# Altium footprint library TMDE_REV1.0.PcbLib: 94 footprints (part 4 of 6)
Each footprint in its own frame and in the unit in brackets; x right, y up, seen from the top. Pads: shape width x height; smd on the part's side, far side on the other; paste and mask are expansions set on the pad; w line width, h text height; cw(c..) or ccw(c..) is an arc to the next point about the centre after c.
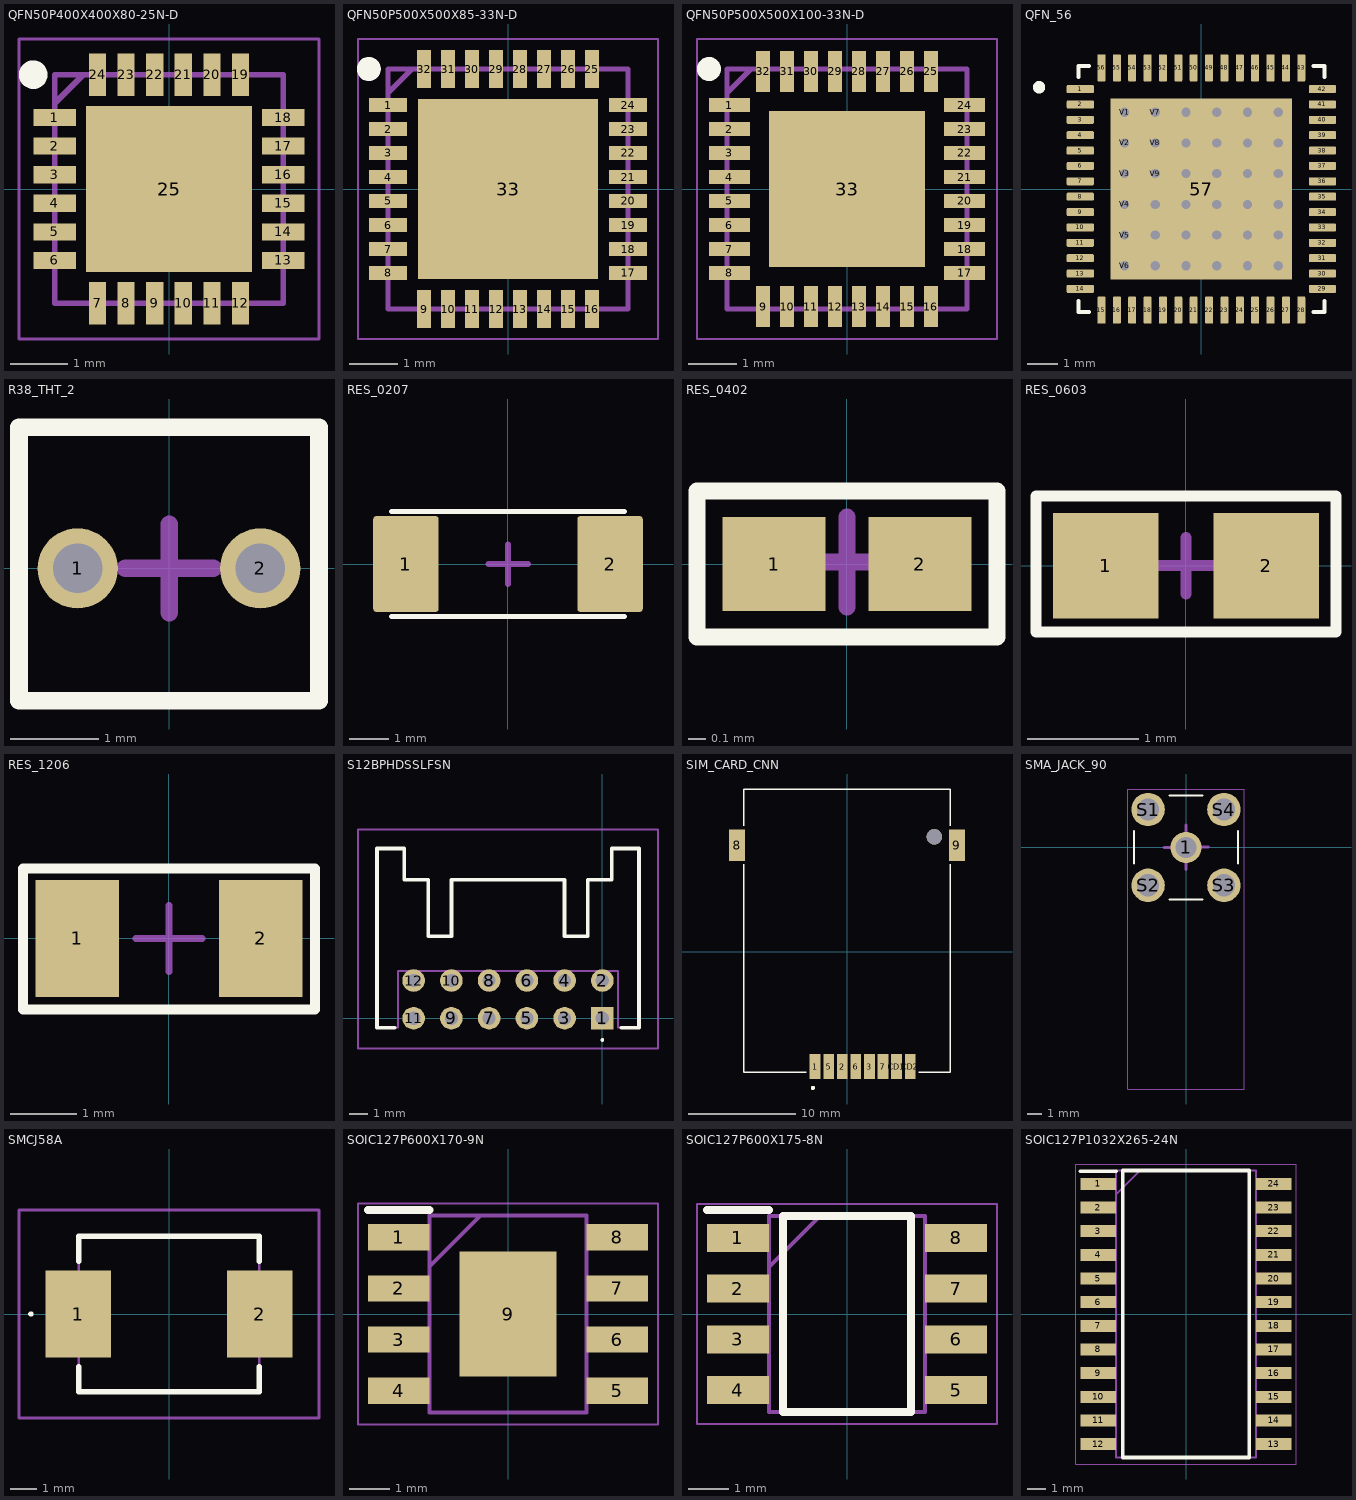
[diagram p3: the footprints below, top view; thin cyan lines are the x and y axes]

## QFN50P400X400X80-25N-D [mm]
pads (25):
  rect 0.75x0.3 smd: 1(-2,1.25) 2(-2,0.75) 3(-2,0.25) 4(-2,-0.25) 5(-2,-0.75) 6(-2,-1.25) 13(2,-1.25) 14(2,-0.75) 15(2,-0.25) 16(2,0.25) 17(2,0.75) 18(2,1.25)
  rect 0.3x0.75 smd: 7(-1.25,-2) 8(-0.75,-2) 9(-0.25,-2) 10(0.25,-2) 11(0.75,-2) 12(1.25,-2) 19(1.25,2) 20(0.75,2) 21(0.25,2) 22(-0.25,2) 23(-0.75,2) 24(-1.25,2)
  rect 2.9x2.9 smd: 25(0,0)
Top Overlay:
  circle w0.25: c-2.375,2 r0.125
Mechanical 13:
  lines w0.1: -2,1.5 -1.5,2 ; -2,-2 -2,2 2,2 2,-2 -2,-2
Mechanical 15:
  lines w0.05: -2.625,-2.625 -2.625,2.625 2.625,2.625 2.625,-2.625 -2.625,-2.625
3D body "CAT4016HV6-GT2.stp": height 0.8, standoff 0, extent -2.05,-2.05 2.05,2.05

## QFN50P500X500X85-33N-D [mm]
pads (33):
  rect 0.8x0.3 smd: 1(-2.5,1.75) 2(-2.5,1.25) 3(-2.5,0.75) 4(-2.5,0.25) 5(-2.5,-0.25) 6(-2.5,-0.75) 7(-2.5,-1.25) 8(-2.5,-1.75) 17(2.5,-1.75) 18(2.5,-1.25) 19(2.5,-0.75) 20(2.5,-0.25) 21(2.5,0.25) 22(2.5,0.75) 23(2.5,1.25) 24(2.5,1.75)
  rect 0.3x0.8 smd: 9(-1.75,-2.5) 10(-1.25,-2.5) 11(-0.75,-2.5) 12(-0.25,-2.5) 13(0.25,-2.5) 14(0.75,-2.5) 15(1.25,-2.5) 16(1.75,-2.5) 25(1.75,2.5) 26(1.25,2.5) 27(0.75,2.5) 28(0.25,2.5) 29(-0.25,2.5) 30(-0.75,2.5) 31(-1.25,2.5) 32(-1.75,2.5)
  rect 3.75x3.75 smd: 33(0,0)
Top Overlay:
  circle w0.25: c-2.9,2.5 r0.125
Mechanical 13:
  lines w0.1: -2.5,2 -2,2.5 ; -2.5,-2.5 -2.5,2.5 2.5,2.5 2.5,-2.5 -2.5,-2.5
Mechanical 15:
  lines w0.05: -3.125,-3.125 -3.125,3.125 3.125,3.125 3.125,-3.125 -3.125,-3.125
3D body "PCA8561AHN_AY.stp": height 0.86, standoff 0.01, extent -2.56,-2.56 2.56,2.56

## QFN50P500X500X100-33N-D [mm]
pads (33):
  rect 0.85x0.3 smd: 1(-2.45,1.75) 2(-2.45,1.25) 3(-2.45,0.75) 4(-2.45,0.25) 5(-2.45,-0.25) 6(-2.45,-0.75) 7(-2.45,-1.25) 8(-2.45,-1.75) 17(2.45,-1.75) 18(2.45,-1.25) 19(2.45,-0.75) 20(2.45,-0.25) 21(2.45,0.25) 22(2.45,0.75) 23(2.45,1.25) 24(2.45,1.75)
  rect 0.3x0.85 smd: 9(-1.75,-2.45) 10(-1.25,-2.45) 11(-0.75,-2.45) 12(-0.25,-2.45) 13(0.25,-2.45) 14(0.75,-2.45) 15(1.25,-2.45) 16(1.75,-2.45) 25(1.75,2.45) 26(1.25,2.45) 27(0.75,2.45) 28(0.25,2.45) 29(-0.25,2.45) 30(-0.75,2.45) 31(-1.25,2.45) 32(-1.75,2.45)
  rect 3.25x3.25 smd: 33(0,0)
Top Overlay:
  circle w0.25: c-2.875,2.5 r0.125
Mechanical 13:
  lines w0.1: -2.5,2 -2,2.5 ; -2.5,-2.5 2.5,-2.5 2.5,2.5 -2.5,2.5 -2.5,-2.5
Mechanical 15:
  lines w0.05: -3.125,-3.125 3.125,-3.125 3.125,3.125 -3.125,3.125 -3.125,-3.125
3D body "MFRC52201HN1,115.stp": height 1, standoff 0, extent -2.55,-2.55 2.55,2.55

## QFN_56 [mm]
pads (93):
  rrect25% 0.88x0.26 smd: 1(-3.94,3.25) 2(-3.94,2.75) 3(-3.94,2.25) 4(-3.94,1.75) 5(-3.94,1.25) 6(-3.94,0.75) 7(-3.94,0.25) 8(-3.94,-0.25) 9(-3.94,-0.75) 10(-3.94,-1.25) 11(-3.94,-1.75) 12(-3.94,-2.25) 13(-3.94,-2.75) 14(-3.94,-3.25) 29(3.94,-3.25) 30(3.94,-2.75) 31(3.94,-2.25) 32(3.94,-1.75) 33(3.94,-1.25) 34(3.94,-0.75) 35(3.94,-0.25) 36(3.94,0.25) 37(3.94,0.75) 38(3.94,1.25) 39(3.94,1.75) 40(3.94,2.25) 41(3.94,2.75) 42(3.94,3.25)
  rrect25% 0.26x0.88 smd: 15(-3.25,-3.94) 16(-2.75,-3.94) 17(-2.25,-3.94) 18(-1.75,-3.94) 19(-1.25,-3.94) 20(-0.75,-3.94) 21(-0.25,-3.94) 22(0.25,-3.94) 23(0.75,-3.94) 24(1.25,-3.94) 25(1.75,-3.94) 26(2.25,-3.94) 27(2.75,-3.94) 28(3.25,-3.94) 43(3.25,3.94) 44(2.75,3.94) 45(2.25,3.94) 46(1.75,3.94) 47(1.25,3.94) 48(0.75,3.94) 49(0.25,3.94) 50(-0.25,3.94) 51(-0.75,3.94) 52(-1.25,3.94) 53(-1.75,3.94) 54(-2.25,3.94) 55(-2.75,3.94) 56(-3.25,3.94)
  rect 5.9x5.9 smd paste-4: 57(0,0)
  round 0.4 hole 0.3: V1(-2.5,2.5) V2(-2.5,1.5) V3(-2.5,0.5) V4(-2.5,-0.5) V5(-2.5,-1.5) V6(-2.5,-2.5) V7(-1.5,2.5) V8(-1.5,1.5) V9(-1.5,0.5) V10(-1.5,-0.5) V11(-1.5,-1.5) V12(-1.5,-2.5) V13(-0.5,2.5) V14(-0.5,1.5) V15(-0.5,0.5) V16(-0.5,-0.5) V17(-0.5,-1.5) V18(-0.5,-2.5) V19(0.5,2.5) V20(0.5,1.5) V21(0.5,0.5) V22(0.5,-0.5) V23(0.5,-1.5) V24(0.5,-2.5) V25(1.5,2.5) V26(1.5,1.5) V27(1.5,0.5) V28(1.5,-0.5) V29(1.5,-1.5) V30(1.5,-2.5) V31(2.5,2.5) V32(2.5,1.5) V33(2.5,0.5) V34(2.5,-0.5) V35(2.5,-1.5) V36(2.5,-2.5)
Top Overlay:
  circle w0.2: c-5.28,3.31 r0.1
  lines w0.127: -4,-3.65 -4,-4 -3.65,-4 ; -4,3.65 -4,4 -3.65,4 ; 3.65,-4 4,-4 4,-3.65 ; 3.65,4 4,4 4,3.65
Top Paste:
  region: 2.7,1.5 1.5,1.5 1.5,2.7 2.7,2.7
  region: 2.7,0.1 1.5,0.1 1.5,1.3 2.7,1.3
  region: 2.7,-1.3 1.5,-1.3 1.5,-0.1 2.7,-0.1
  region: 2.7,-2.7 1.5,-2.7 1.5,-1.5 2.7,-1.5
  region: -1.5,-2.7 -2.7,-2.7 -2.7,-1.5 -1.5,-1.5
  region: 1.3,-2.7 0.1,-2.7 0.1,-1.5 1.3,-1.5
  region: -0.1,-2.7 -1.3,-2.7 -1.3,-1.5 -0.1,-1.5
  region: 1.3,1.5 0.1,1.5 0.1,2.7 1.3,2.7
  region: -0.1,1.5 -1.3,1.5 -1.3,2.7 -0.1,2.7
  region: -1.5,1.5 -2.7,1.5 -2.7,2.7 -1.5,2.7
  region: -1.5,0.1 -2.7,0.1 -2.7,1.3 -1.5,1.3
  region: -1.5,-1.3 -2.7,-1.3 -2.7,-0.1 -1.5,-0.1
  region: 1.3,-1.3 0.1,-1.3 0.1,-0.1 1.3,-0.1
  region: -0.1,-1.3 -1.3,-1.3 -1.3,-0.1 -0.1,-0.1
  region: 1.3,0.1 0.1,0.1 0.1,1.3 1.3,1.3
  region: -0.1,0.1 -1.3,0.1 -1.3,1.3 -0.1,1.3
3D body "LAN9303I-ABZJ-TR.STEP": height 1, standoff 0, extent -4,-4 4,4

## R38_THT_2 [mm]
pads (2):
  round 0.91 hole 0.56: 1(-1.039,-0.002) 2(1.031,-0.002)
Top Overlay:
  lines w0.2: -1.704,-1.502 -1.704,1.598 1.696,1.598 1.696,-1.502 -1.704,-1.502
Mechanical 16:
  lines w0.2: -0.497,-0.002 0.003,-0.002 ; -0.004,-0.002 0.496,-0.002 ; -0.001,-0.502 -0.001,-0.002 ; 0,0 0,0.5
3D body "AB38T-32.768KHZ--3DModel-STEP-400430.STEP": height 9.3, standoff -8, extent -1.628,-1.602 1.549,1.598

## RES_0207 [mm]
pads (2):
  rrect10% 1.66x2.43 smd: 1(-2.585,0) 2(2.585,0)
Top Overlay:
  lines w0.127: -2.95,-1.33 2.95,-1.33 ; -2.95,1.33 2.95,1.33
Mechanical 16:
  lines w0.152: -0.496,-0.001 0.004,-0.001 ; 0,0 0,0.5 ; 0.004,-0.501 0.004,-0.001 ; 0.504,-0.001 0.004,-0.001
3D body "2-1879283-8.stp": height 2.3, standoff 0.1, extent -2.95,-1.11 2.95,1.11

## RES_0402 [mm]
pads (2):
  rect 0.6x0.55 smd mask+0.102: 1(-0.425,0) 2(0.425,0)
Top Overlay:
  lines w0.1: -0.875,-0.425 0.875,-0.425 0.875,0.425 -0.875,0.425 -0.875,-0.425
Mechanical 16:
  lines w0.1: -0.262,0.013 0.263,0.013 ; 0,-0.25 0,0.275
3D body "SW3dPS-d0402h025.STEP": height 0.25, standoff 0, extent -0.5,-0.25 0.5,0.25

## RES_0603 [mm]
pads (2):
  rect 0.95x0.95 smd mask+0.102: 1(-0.725,0) 2(0.725,0)
Top Overlay:
  lines w0.1: -1.355,-0.601 -1.355,0.631 1.355,0.631 1.355,-0.601 -1.355,-0.601
Mechanical 16:
  lines w0.1: -0.254,0 0.254,0 ; 0,-0.254 0,0.254
3D body "User Library-V0603HD.STEP": height 0.9, standoff 0, extent -0.8,-0.4 0.8,0.4

## RES_1206 [mm]
pads (2):
  rect 1.25x1.75 smd mask+0.102: 1(-1.375,0) 2(1.375,0)
Top Overlay:
  lines w0.15: -2.187,-1.063 -2.187,1.047 -1.232,1.047 2.187,1.047 2.187,-1.063 -2.187,-1.063
Mechanical 16:
  lines w0.1: -0.5,0 0.5,0 ; 0,-0.5 0,0.5
3D body "1206 SMD Resistor.STEP": height 1, standoff 0, extent -1.6,-0.8 1.6,0.8

## S12BPHDSSLFSN [mm]
pads (12):
  rect 1.2x1.2 hole 0.7: 1(0,0)
  round 1.2 hole 0.7: 2(0,2) 3(-2,0) 4(-2,2) 5(-4,0) 6(-4,2) 7(-6,0) 8(-6,2) 9(-8,0) 10(-8,2) 11(-10,0) 12(-10,2)
Top Overlay:
  lines w0.1: 0,-1.2 ccw(c0,-1.15) 0,-1.1 ccw(c0,-1.15) 0,-1.2
  lines w0.2: -11,-0.5 -11.95,-0.5 -11.95,9 -10.5,9 -10.5,7.345 -9.226,7.345 -9.226,4.35 -8,4.35 -8,7.345 -2,7.345 -2,4.35 -0.774,4.35 -0.774,7.345 0.5,7.345 0.5,9 1.95,9 1.95,-0.5 1,-0.5
Mechanical 13:
  lines w0.1: -11.95,-0.5 -11.95,5.65 -11.95,9 -10.5,9 -10.5,7.345 -9.226,7.345 -9.226,4.35 -8,4.35 -8,7.345 -2,7.345 -2,4.35 -0.774,4.35 -0.8,7.345 0.5,7.345 0.5,9 1.95,9 1.95,-0.5 0.835,-0.5 0.835,2.5 -10.835,2.5 -10.835,-0.5 -11.95,-0.5
Mechanical 15:
  lines w0.1: -12.95,-1.6 2.95,-1.6 2.95,10 -12.95,10 -12.95,-1.6
3D body "S12B-PHDSS__LF__SN_.stp": height 5.1, standoff -5, extent -11.95,-0.5 1.95,9

## SIM_CARD_CNN [mm]
pads (11):
  rect 1x2.3 smd: 1(-2.985,-10.735) 2(-0.445,-10.735) 3(2.095,-10.735) 5(-1.715,-10.735) 6(0.825,-10.735) 7(3.365,-10.735) CD1(4.635,-10.735) CD2(5.905,-10.735)
  rect 1.5x2.95 smd: 8(-10.275,9.965) 9(10.275,9.965)
  round 1.45 hole 1.45 unplated: ""(8.165,10.735)
Top Overlay:
  circle w0.2: c-3.185,-12.735 r0.1
  lines w0.127: -9.675,8.165 -9.675,-11.285 -3.805,-11.285 ; -9.675,11.765 -9.675,15.215 9.675,15.215 9.675,11.765 ; 6.725,-11.285 9.675,-11.285 9.675,8.165
3D body "47553-2001.stp": height 1.94, standoff -0.56, extent -10.512,-11.662 10.438,14.838

## SMA_JACK_90 [mm]
pads (5):
  round 2.1 hole 1.4: 1(0,0)
  round 2.25 hole 1.5: S1(-2.55,2.55) S2(-2.55,-2.55) S3(2.55,-2.55) S4(2.55,2.55)
Top Overlay:
  lines w0.127: -3.5,-1.1 -3.5,1.1 ; -1.1,-3.5 1.1,-3.5 ; -1.1,3.5 1.1,3.5 ; 3.5,-1.1 3.5,1.1
Mechanical 15:
  lines w0.05: -3.93,-16.25 -3.93,3.93 3.93,3.93 3.93,-16.25 -3.93,-16.25
Mechanical 16:
  lines w0.2: -1.492,0.004 0.008,0.004 ; 0,0 0,1.5 ; 0.008,-1.486 0.008,0.014 1.508,0.014
3D body "step_temp.STEP": height 11.7, standoff -3.9, extent -5.071,-16.016 5.124,3.484

## SMCJ58A [mm]
pads (2):
  rect 2.5x3.3 smd: 1(-3.45,0) 2(3.45,0)
Top Overlay:
  lines w0.1: -5.3,0 cw(c-5.25,0) -5.2,0 cw(c-5.25,0) -5.3,0
  lines w0.2: -3.428,-2 -3.428,-2.953 3.428,-2.953 3.428,-2 ; -3.428,2 -3.428,2.953 3.428,2.953 3.428,2
Mechanical 13:
  lines w0.1: -3.428,-2.953 -3.428,2.953 3.428,2.953 3.428,-2.953 -3.428,-2.953
Mechanical 15:
  lines w0.1: -5.7,-3.953 -5.7,3.953 5.7,3.953 5.7,-3.953 -5.7,-3.953
3D body "SMCJ58A.stp": height 2.62, standoff 0, extent -3.97,-2.953 3.97,2.953

## SOIC127P600X170-9N [mm]
pads (9):
  rect 1.525x0.65 smd: 1(-2.712,1.905) 2(-2.712,0.635) 3(-2.712,-0.635) 4(-2.712,-1.905) 5(2.712,-1.905) 6(2.712,-0.635) 7(2.712,0.635) 8(2.712,1.905)
  rect 2.4x3.1 smd: 9(0,0)
Top Overlay:
  lines w0.2: -3.475,2.58 -1.95,2.58
Mechanical 13:
  lines w0.1: -1.95,1.18 -0.68,2.45 ; -1.95,-2.45 -1.95,2.45 1.95,2.45 1.95,-2.45 -1.95,-2.45
Mechanical 15:
  lines w0.05: -3.725,-2.75 -3.725,2.75 3.725,2.75 3.725,-2.75 -3.725,-2.75
3D body "TPS54360QDDARQ1.stp": height 1.57, standoff 0, extent -3,-2.45 3,2.45

## SOIC127P600X175-8N [mm]
pads (8):
  rect 1.55x0.7 smd: 1(-2.725,1.905) 2(-2.725,0.635) 3(-2.725,-0.635) 4(-2.725,-1.905) 5(2.725,-1.905) 6(2.725,-0.635) 7(2.725,0.635) 8(2.725,1.905)
Top Overlay:
  lines w0.2: -3.5,2.605 -1.95,2.605 ; -1.6,-2.45 -1.6,2.45 1.6,2.45 1.6,-2.45 -1.6,-2.45
Mechanical 13:
  lines w0.1: -1.95,1.18 -0.68,2.45 ; -1.95,-2.45 -1.95,2.45 1.95,2.45 1.95,-2.45 -1.95,-2.45
Mechanical 15:
  lines w0.05: -3.75,-2.75 -3.75,2.75 3.75,2.75 3.75,-2.75 -3.75,-2.75
3D body "TJA1042T_1J.stp": height 1.75, standoff 0, extent -3,-2.45 3,2.45

## SOIC127P1032X265-24N [mm]
pads (24):
  rect 1.925x0.65 smd: 1(-4.712,6.985) 2(-4.712,5.715) 3(-4.712,4.445) 4(-4.712,3.175) 5(-4.712,1.905) 6(-4.712,0.635) 7(-4.712,-0.635) 8(-4.712,-1.905) 9(-4.712,-3.175) 10(-4.712,-4.445) 11(-4.712,-5.715) 12(-4.712,-6.985) 13(4.712,-6.985) 14(4.712,-5.715) 15(4.712,-4.445) 16(4.712,-3.175) 17(4.712,-1.905) 18(4.712,-0.635) 19(4.712,0.635) 20(4.712,1.905) 21(4.712,3.175) 22(4.712,4.445) 23(4.712,5.715) 24(4.712,6.985)
Top Overlay:
  lines w0.2: -5.675,7.66 -3.75,7.66 ; -3.4,-7.7 3.4,-7.7 3.4,7.7 -3.4,7.7 -3.4,-7.7
Mechanical 13:
  lines w0.1: -3.75,6.43 -2.48,7.7 ; -3.75,-7.7 3.75,-7.7 3.75,7.7 -3.75,7.7 -3.75,-7.7
Mechanical 15:
  lines w0.05: -5.925,-8.05 5.925,-8.05 5.925,8.05 -5.925,8.05 -5.925,-8.05
3D body "MAX7219CWG+T.stp": height 2.65, standoff 0, extent -5.162,-7.7 5.162,7.7